# Altium footprint library SK54AFLTP.PcbLib: 1 footprints
Each footprint in its own frame and in the unit in brackets; x right, y up, seen from the top. Pads: shape width x height; smd on the part's side, far side on the other; paste and mask are expansions set on the pad; w line width, h text height; cw(c..) or ccw(c..) is an arc to the next point about the centre after c.
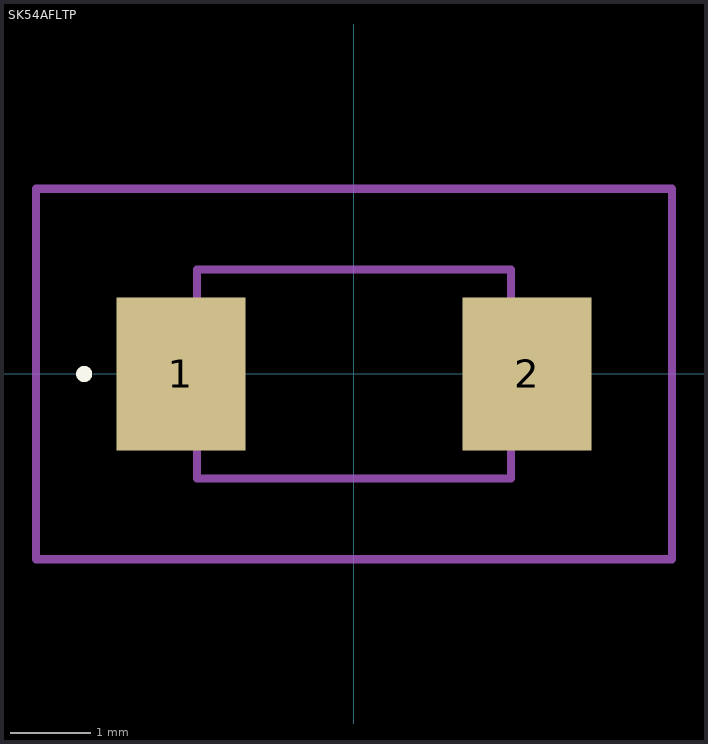
[diagram p0: the footprint, top view; thin cyan lines are the x and y axes]

## SK54AFLTP [mm]
pads (2):
  rect 1.6x1.9 smd: 1(-2.15,0) 2(2.15,0)
Top Overlay:
  lines w0.1: -3.4,0 cw(c-3.35,0) -3.3,0 ; -3.4,0 -3.4,0 ; -3.4,0 ccw(c-3.35,0) -3.3,0 ; -3.3,0 -3.3,0
Mechanical 15:
  lines w0.1: -1.95,-1.3 1.95,-1.3 1.95,1.3 -1.95,1.3 -1.95,-1.3
Mechanical 20:
  lines w0.1: -3.95,-2.3 3.95,-2.3 3.95,2.3 -3.95,2.3 -3.95,-2.3